# Altium footprint library LimeMicroAltiumLib.PcbLib: 876 footprints (part 2 of 57)
Each footprint in its own frame and in the unit in brackets; x right, y up, seen from the top. Pads: shape width x height; smd on the part's side, far side on the other; paste and mask are expansions set on the pad; w line width, h text height; cw(c..) or ccw(c..) is an arc to the next point about the centre after c.
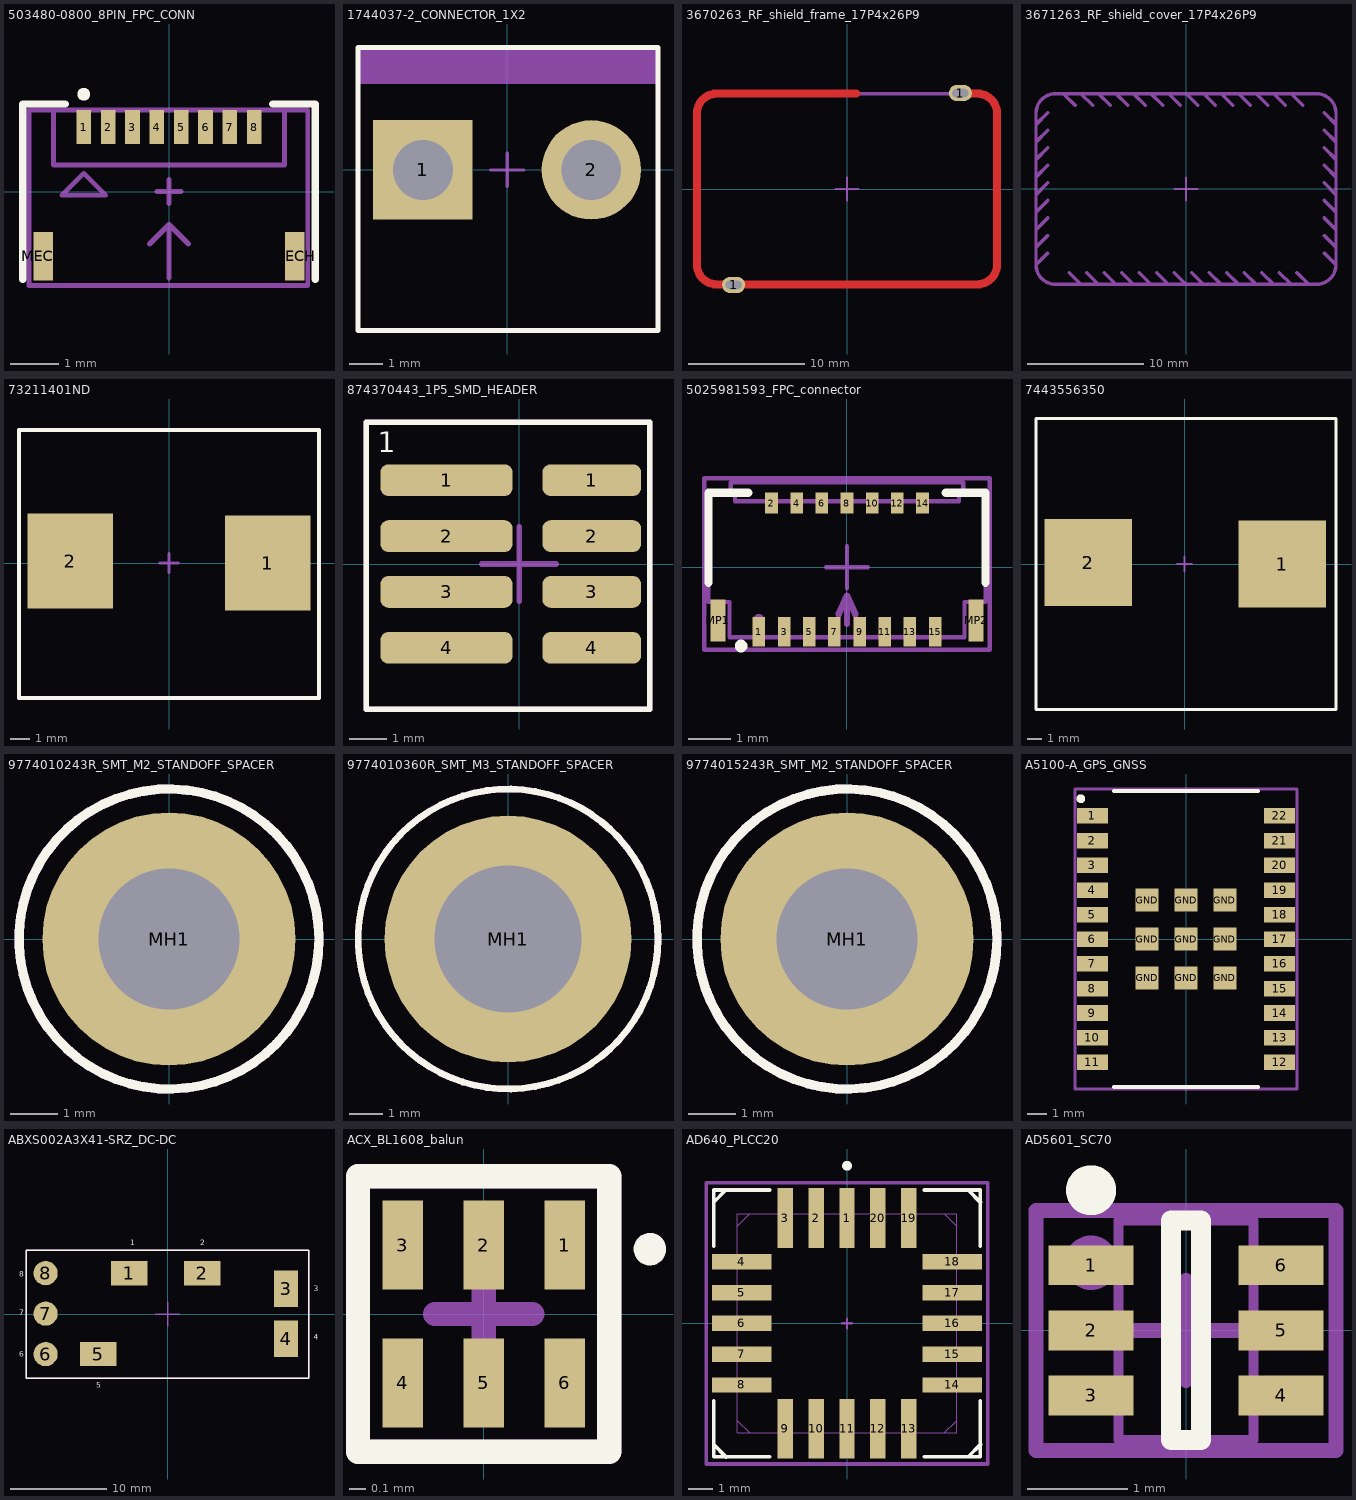
[diagram p1: the footprints below, top view; thin cyan lines are the x and y axes]

## 503480-0800_8PIN_FPC_CONN [mm]
pads (10):
  rect 0.3x0.7 smd mask+0.05: 1(-1.75,1.325) 2(-1.25,1.325) 3(-0.75,1.325) 4(-0.25,1.325) 5(0.25,1.325) 6(0.75,1.325) 7(1.25,1.325) 8(1.75,1.325)
  rect 0.4x1 smd mask+0.05: MECH(-2.58,-1.325) MECH(2.58,-1.325)
Top Overlay:
  circle w0.2: c-1.75,2 r0.033
  lines w0.15: -3,-1.8 -3,1.8 -2.125,1.8 ; 2.125,1.8 3,1.8 3,-1.8
Mechanical 15:
  lines w0.1: -2.375,1.65 -2.375,0.55 2.375,0.55 2.375,1.65 ; -1.3,-0.075 -2.201,-0.075 -1.75,0.376 -1.299,-0.075 ; -0.4,-1.075 0,-0.675 ; -0.25,0 0,0 ; 0,-1.775 0,-0.675 ; 0,-0.25 0,0 ; 0,0.25 0,0 ; 0.25,0 0,0 ; 0.4,-1.075 0,-0.675 ; 0,-0.675 0,-0.675 ; -2.875,-1.925 2.85,-1.925 2.85,1.675 -2.875,1.675 -2.875,-1.925
  text ".Designator" at 0,0 h0.55
3D body "Molex FPC 503480-0800.stp": height 1.88, standoff -0.02, extent -2.85,-1.925 2.85,1.675

## 1744037-2_CONNECTOR_1X2 [mm]
pads (2):
  rect 3x3 hole 1.8 mask+0.05: 1(-2.54,0)
  round 3 hole 1.8 mask+0.05: 2(2.54,0)
Top Overlay:
  lines w0.152: -4.5,-4.85 -4.5,3.7 4.55,3.7 4.55,-4.85 -4.5,-4.85
Mechanical 15:
  region: -4.5,3.7 -4.5,2.6 4.55,2.6 4.55,3.7
  lines w0.1: 0.5,0 -0.5,0 0,0 ; 0,0 0,-0.5 0,0.5 0,0 ; -4.5,-4.85 4.55,-4.85 4.55,3.7 -4.5,3.7 -4.5,-4.85
  text "Locking shroud" at -3.75,1.9 h0.55
  text ".Designator" at 0,0 h0.55
3D body "c-1744037-2-1-3d.stp": height 10.9, standoff -3.7, extent -4.52,-4.82 4.52,3.7

## 3670263_RF_shield_frame_17P4x26P9 [mm]
pads (2):
  oval 2x1.4 hole 0.7 slot 1.4 at 0 deg mask+0.05: 1(-9.75,-8.25) 1(9.75,8.25)
Top Layer:
  lines w0.7: 0.8,8.2 -11.207,8.2 ccw(c-11.207,6.507) -12.9,6.507 -12.9,-6.507 ccw(c-11.207,-6.507) -11.207,-8.2 11.207,-8.2 ccw(c11.207,-6.507) 12.9,-6.507 12.9,6.507 ccw(c11.207,6.507) 11.207,8.2 9.75,8.2
Mechanical 15:
  lines w0.15: -1,0 0,0 ; 0,-1 0,0 ; 0,1 0,0 ; 1,0 0,0
  lines w0.3: -12.9,-6.507 ccw(c-11.207,-6.507) -11.207,-8.2 11.207,-8.2 ccw(c11.207,-6.507) 12.9,-6.507 12.9,6.507 ccw(c11.207,6.507) 11.207,8.2 -11.207,8.2 ccw(c-11.207,6.507) -12.9,6.507 -12.9,-6.507
  text ".Designator" at 0,0 h0.55
  text "RF shield frame" at -3.5,-7.7 h0.55
3D body "STP_3670263 (rev1).stp": height 4.5, standoff -1.2, extent -13.15,-8.4 13.15,8.4

## 3671263_RF_shield_cover_17P4x26P9 [mm]
Mechanical 15:
  lines w0.15: -1,0 0,0 ; 0,-1 0,0 ; 0,1 0,0 ; 1,0 0,0
  lines w0.3: -12.9,-5 -11.9,-4 ; -12.9,-3.493 -11.9,-2.493 ; -12.9,-1.986 -11.9,-0.986 ; -12.9,-0.478 -11.9,0.522 ; -12.9,1.029 -11.9,2.029 ; -12.9,2.536 -11.9,3.536 ; -12.9,4.043 -11.9,5.043 ; -12.9,5.55 -11.9,6.55 ; -11.9,-5.507 -12.9,-6.507 ; -10.543,8.2 -9.543,7.2 ; -10.05,-7.2 -9.05,-8.2 ; -9.036,8.2 -8.036,7.2 ; -8.543,-7.2 -7.543,-8.2 ; -7.529,8.2 -6.529,7.2 ; -7.036,-7.2 -6.036,-8.2 ; -6.022,8.2 -5.022,7.2 ; -5.529,-7.2 -4.529,-8.2 ; -4.514,8.2 -3.514,7.2 ; -4.022,-7.2 -3.022,-8.2 ; -3.007,8.2 -2.007,7.2 ; -2.514,-7.2 -1.514,-8.2 ; -1.5,8.2 -0.5,7.2 ; -1.007,-7.2 -0.007,-8.2 ; 0.007,8.2 1.007,7.2 ; 0.5,-7.2 1.5,-8.2 ; 1.514,8.2 2.514,7.2 ; 2.007,-7.2 3.007,-8.2 ; 3.022,8.2 4.022,7.2 ; 3.514,-7.2 4.514,-8.2 ; 4.529,8.2 5.529,7.2 ; 5.022,-7.2 6.022,-8.2 ; 6.036,8.2 7.036,7.2 ; 6.529,-7.2 7.529,-8.2 ; 7.543,8.2 8.543,7.2 ; 8.036,-7.2 9.036,-8.2 ; 9.05,8.2 10.05,7.2 ; 9.543,-7.2 10.543,-8.2 ; 11.9,-5.507 12.9,-6.507 ; 11.9,-4 12.9,-5 ; 11.9,-2.493 12.9,-3.493 ; 11.9,-0.986 12.9,-1.986 ; 11.9,0.522 12.9,-0.478 ; 11.9,2.029 12.9,1.029 ; 11.9,3.536 12.9,2.536 ; 11.9,5.043 12.9,4.043 ; 11.9,6.55 12.9,5.55 ; -12.9,-6.507 ccw(c-11.207,-6.507) -11.207,-8.2 11.207,-8.2 ccw(c11.207,-6.507) 12.9,-6.507 ; -12.9,-6.507 -12.9,6.507 cw(c-11.207,6.507) -11.207,8.2 11.207,8.2 cw(c11.207,6.507) 12.9,6.507 12.9,-6.507
  text ".Designator" at 0,0 h0.55
  text "RF shield cover" at -3.5,6.4 h0.55
3D body "STP_3671263 (rev1).stp": height 4.9, standoff 0.9, extent -13.45,-8.7 13.45,8.7

## 73211401ND [mm]
pads (2):
  rect 4.5x5 smd: 1(5.2,0) 2(-5.2,0.1)
Top Overlay:
  lines w0.2: -7.9,-7.1 7.9,-7.1 7.9,7 -7.9,7 -7.9,-7.1
Mechanical 15:
  lines w0.15: -0.5,0 0.5,0 ; 0,-0.5 0,0.5 ; -7.9,-7.1 7.9,-7.1 7.9,7 -7.9,7 -7.9,-7.1
  text ".Designator" at 0,0 h0.55
3D body: height 6.5, standoff 0, extent -6.4,-6.4 6.4,6.4

## 874370443_1P5_SMD_HEADER [mm] "Supercapacitor 1.5mm pitch header"
pads (8):
  rrect50% 3.55x0.85 smd mask+0.05: 1(-1.95,2.25) 2(-1.95,0.75) 3(-1.95,-0.75) 4(-1.95,-2.25)
  rrect50% 2.65x0.85 smd mask+0.05: 1(1.95,2.25) 2(1.95,0.75) 3(1.95,-0.75) 4(1.95,-2.25)
Top Overlay:
  lines w0.15: -4.1,-3.9 3.5,-3.9 3.5,3.8 -4.1,3.8 -4.1,-3.9
  text "1" at -3.8,3 h0.55
Mechanical 15:
  lines w0.15: -1,0 0,0 ; 0,-1 0,0 ; 0,1 0,0 ; 1,0 0,0 ; -4.1,-3.9 3.5,-3.9 3.5,3.8 -4.1,3.8 -4.1,-3.9
  text "1" at -3.8,3 h0.55
  text ".Designator" at 0,0 h0.55
3D body "874370443.stp": height 5.77, standoff 0.02, extent -3.25,-3.7 2.75,3.6

## 5025981593_FPC_connector [mm]
pads (17):
  rect 0.3x0.7 smd mask+0.05: 1(-2.1,-1.532) 3(-1.5,-1.532) 5(-0.9,-1.532) 7(-0.3,-1.532) 9(0.3,-1.532) 11(0.9,-1.532) 13(1.5,-1.532) 15(2.1,-1.532)
  rect 0.3x0.5 smd mask+0.05: 2(-1.8,1.533) 4(-1.2,1.533) 6(-0.6,1.533) 8(0,1.533) 10(0.6,1.533) 12(1.2,1.533) 14(1.8,1.533)
  rect 0.35x1 smd mask+0.05: MP1(-3.075,-1.267) MP2(3.075,-1.267)
Top Overlay:
  circle w0.25: c-2.525,-1.875 r0.025
  lines w0.2: -3.3,-0.371 -3.3,1.775 -2.35,1.775 ; 2.35,1.775 3.3,1.775 3.3,-0.371
Mechanical 13:
  lines w0.1: -2.77,1.775 -2.77,2.025 2.77,2.025 2.77,1.775 ; -3.3,-0.825 -3.3,1.775 -2.67,1.775 -2.67,1.575 2.67,1.575 2.67,1.775 3.3,1.775 3.3,-0.825 2.8,-0.825 2.8,-1.667 -2.8,-1.667 -2.8,-0.825 -3.3,-0.825
Mechanical 15:
  circle w0.2: c-2.1,-1.25 r0.035
  lines w0.1: -0.5,0 0.5,0 ; 0,-0.5 0,0.5 ; -3.4,-1.967 3.4,-1.967 3.4,2.125 -3.4,2.125 -3.4,-1.967
  lines w0.15: -0.2,-1.125 0,-0.675 ; 0,-1.35 0,-0.675 ; 0.2,-1.125 0,-0.675
  text "Connector input" at -2.875,-1.8 h0.4
  text ".Designator" at 0,0 h0.55
3D body "5025981593.stp": height 1.16, standoff 0.01, extent -3.3,-1.775 3.3,2.025

## 7443556350 [mm]
pads (2):
  rect 6x6 smd: 1(6.7,0) 2(-6.6,0.1)
Top Overlay:
  lines w0.2: -10.2,-10 -10.2,10 10.4,10 10.4,-10 -10.2,-10
Mechanical 15:
  lines w0.15: -0.5,0 0.5,0 ; 0,-0.5 0,0.5 ; -10.2,-10 -10.2,10 10.4,10 10.4,-10 -10.2,-10
  text ".Designator" at 0,0 h0.55
3D body: height 9, standoff 0, extent -9.1,-9.1 9.1,9.1

## 9774010243R_SMT_M2_STANDOFF_SPACER [mm]
pads (1):
  round 5.4 hole 3 unplated: MH1(0,0)
Top Overlay:
  circle w0.2: c0,0 r3.2
Top Paste:
  region: 0,0
  region: -1.475,0.25 -2.688,0.25 -2.667,0.483 -2.544,0.936 -2.344,1.36 -2.075,1.743 -1.743,2.075 -1.36,2.344 -0.936,2.544 -0.483,2.667 -0.25,2.688 -0.25,1.475 -0.7,1.325 -1.075,1.05 -1.35,0.675
  region: 1.475,0.25 2.688,0.25 2.667,0.483 2.544,0.936 2.344,1.36 2.075,1.743 1.743,2.075 1.36,2.344 0.936,2.544 0.483,2.667 0.25,2.688 0.25,1.475 0.7,1.325 1.075,1.05 1.35,0.675
  region: 1.475,-0.25 2.688,-0.25 2.667,-0.483 2.544,-0.936 2.344,-1.36 2.075,-1.743 1.743,-2.075 1.36,-2.344 0.936,-2.544 0.483,-2.667 0.25,-2.688 0.25,-1.475 0.7,-1.325 1.075,-1.05 1.35,-0.675
  region: -1.475,-0.25 -2.688,-0.25 -2.667,-0.483 -2.544,-0.936 -2.344,-1.36 -2.075,-1.743 -1.743,-2.075 -1.36,-2.344 -0.936,-2.544 -0.483,-2.667 -0.25,-2.688 -0.25,-1.475 -0.7,-1.325 -1.075,-1.05 -1.35,-0.675
Mechanical 15:
  circle w0.2: c0,0 r3.2
  lines w0.15: -0.675,0 0,0 ; 0,-0.675 0,0 ; 0,0.675 0,0 ; 0.675,0 0,0
  text ".Designator" at 0,0 h0.55
  text "SMT M2 screw standoff" at -1.5,0.9 h0.4
3D body "9774010243R+(rev1).stp": height 1, standoff -1.4, extent -2.175,-2.172 2.175,2.172

## 9774010360R_SMT_M3_STANDOFF_SPACER [mm]
pads (1):
  round 7.4 hole 4.4 unplated: MH1(0,0)
Top Overlay:
  circle w0.2: c0,0 r4.5
Top Paste:
  region: -0.4,3.684 -0.609,3.663 -1.02,3.576 -1.417,3.441 -1.797,3.262 -2.154,3.041 -2.483,2.78 -2.78,2.483 -3.041,2.154 -3.262,1.797 -3.441,1.417 -3.576,1.02 -3.663,0.609 -3.684,0.4 -2.163,0.4 -2.127,0.562 -2.019,0.875 -1.865,1.168 -1.668,1.434 -1.434,1.668 -1.168,1.865 -0.875,2.019 -0.562,2.127 -0.4,2.163
  region: 0.4,3.684 0.609,3.663 1.02,3.576 1.417,3.441 1.797,3.262 2.154,3.041 2.483,2.78 2.78,2.483 3.041,2.154 3.262,1.797 3.441,1.417 3.576,1.02 3.663,0.609 3.684,0.4 2.163,0.4 2.127,0.562 2.019,0.875 1.865,1.168 1.668,1.434 1.434,1.668 1.168,1.865 0.875,2.019 0.562,2.127 0.4,2.163
  region: 0.4,-3.684 0.609,-3.663 1.02,-3.576 1.417,-3.441 1.797,-3.262 2.154,-3.041 2.483,-2.78 2.78,-2.483 3.041,-2.154 3.262,-1.797 3.441,-1.417 3.576,-1.02 3.663,-0.609 3.684,-0.4 2.163,-0.4 2.127,-0.562 2.019,-0.875 1.865,-1.168 1.668,-1.434 1.434,-1.668 1.168,-1.865 0.875,-2.019 0.562,-2.127 0.4,-2.163
  region: -0.4,-3.684 -0.609,-3.663 -1.02,-3.576 -1.417,-3.441 -1.797,-3.262 -2.154,-3.041 -2.483,-2.78 -2.78,-2.483 -3.041,-2.154 -3.262,-1.797 -3.441,-1.417 -3.576,-1.02 -3.663,-0.609 -3.684,-0.4 -2.163,-0.4 -2.127,-0.562 -2.019,-0.875 -1.865,-1.168 -1.668,-1.434 -1.434,-1.668 -1.168,-1.865 -0.875,-2.019 -0.562,-2.127 -0.4,-2.163
Mechanical 15:
  circle w0.2: c0,0 r4.501
  lines w0.15: -0.675,0 0,0 ; 0,-0.675 0,0 ; 0,0.675 0,0 ; 0.675,0 0,0
  text "SMT M3 screw standoff" at -2.4,1.2 h0.4
  text ".Designator" at 0,0 h0.55
3D body "9774010360R.stp": height 1, standoff -1.4, extent -3,-3 3,3

## 9774015243R_SMT_M2_STANDOFF_SPACER [mm]
pads (1):
  round 5.4 hole 3 unplated: MH1(0,0)
Top Overlay:
  circle w0.2: c0,0 r3.2
Top Paste:
  region: 0,0
  region: -1.475,0.25 -2.688,0.25 -2.667,0.483 -2.544,0.936 -2.344,1.36 -2.075,1.743 -1.743,2.075 -1.36,2.344 -0.936,2.544 -0.483,2.667 -0.25,2.688 -0.25,1.475 -0.7,1.325 -1.075,1.05 -1.35,0.675
  region: 1.475,0.25 2.688,0.25 2.667,0.483 2.544,0.936 2.344,1.36 2.075,1.743 1.743,2.075 1.36,2.344 0.936,2.544 0.483,2.667 0.25,2.688 0.25,1.475 0.7,1.325 1.075,1.05 1.35,0.675
  region: 1.475,-0.25 2.688,-0.25 2.667,-0.483 2.544,-0.936 2.344,-1.36 2.075,-1.743 1.743,-2.075 1.36,-2.344 0.936,-2.544 0.483,-2.667 0.25,-2.688 0.25,-1.475 0.7,-1.325 1.075,-1.05 1.35,-0.675
  region: -1.475,-0.25 -2.688,-0.25 -2.667,-0.483 -2.544,-0.936 -2.344,-1.36 -2.075,-1.743 -1.743,-2.075 -1.36,-2.344 -0.936,-2.544 -0.483,-2.667 -0.25,-2.688 -0.25,-1.475 -0.7,-1.325 -1.075,-1.05 -1.35,-0.675
Mechanical 15:
  circle w0.2: c0,0 r3.2
  lines w0.15: -0.675,0 0,0 ; 0,-0.675 0,0 ; 0,0.675 0,0 ; 0.675,0 0,0
  text ".Designator" at 0,0 h0.55
  text "SMT M2 screw standoff" at -1.5,0.9 h0.4
3D body "9774015243R+(rev1).stp": height 1.5, standoff -1.4, extent -2.175,-2.172 2.175,2.172

## A5100-A_GPS_GNSS [mm] "RF Receiver 1.575GHz -165dBm 115.2kBaud Module"
pads (31):
  rect 1.6x0.8 smd mask+0.05: 1(-4.8,6.32) 2(-4.8,5.05) 3(-4.8,3.78) 4(-4.8,2.51) 5(-4.8,1.24) 6(-4.8,-0.01) 7(-4.8,-1.28) 8(-4.8,-2.55) 9(-4.8,-3.8) 10(-4.8,-5.07) 11(-4.8,-6.32) 12(4.8,-6.32) 13(4.8,-5.07) 14(4.8,-3.8) 15(4.8,-2.55) 16(4.8,-1.28) 17(4.8,-0.01) 18(4.8,1.24) 19(4.8,2.51) 20(4.8,3.78) 21(4.8,5.05) 22(4.8,6.32)
  rect 1.2x1.2 smd mask+0.05: GND(-2,-2) GND(-2,0) GND(-2,2) GND(0,-2) GND(0,0) GND(0,2) GND(2,-2) GND(2,0) GND(2,2)
Top Overlay:
  circle w0.25: c-5.4,7.2 r0.1
  lines w0.2: -3.7,-7.6 3.7,-7.6 ; -3.7,7.6 3.7,7.6
Mechanical 15:
  circle w0.25: c-4.8,6.2 r0.1
  lines w0.15: -0.5,0 0.5,0 ; 0,-0.5 0,0.5 ; -5.7,-7.7 -5.7,7.7 5.7,7.7 5.7,-7.7 -5.7,-7.7
  text ".Designator" at 0.025,0 h0.55
  text "Stencil thickness:  / 120um-150um" at -1,-5.1 h0.55
3D body: height 2.51, standoff 0, extent -3.488,5.003 -2.094,6.4
3D body: height 2.5, standoff 1.6, extent -4,-7 4,7
3D body: height 1.6, standoff 0, extent -5.1,-7.5 5.1,7.5

## ABXS002A3X41-SRZ_DC-DC [mm]
pads (8):
  rect 3.78x2.51 smd mask+0.05: 1(-3.975,4.255) 2(3.615,4.255) 5(-7.155,-4.125)
  rect 2.51x3.78 smd mask+0.05: 3(12.265,2.645) 4(12.265,-2.535)
  round 2.51 smd mask+0.05: 6(-12.625,-4.125) 7(-12.625,0.065) 8(-12.625,4.255)
Top Overlay:
  lines w0.15: -14.625,-6.625 -14.625,6.625 14.625,6.625 14.625,-6.625 -14.625,-6.625
  text "1" at -3.875,7.125 h0.55
  text "2" at 3.375,7.125 h0.55
  text "3" at 15.125,2.375 h0.55
  text "4" at 15.125,-2.625 h0.55
  text "5" at -7.375,-7.625 h0.55
  text "6" at -15.375,-4.375 h0.55
  text "7" at -15.375,-0.125 h0.55
  text "8" at -15.375,3.875 h0.55
Mechanical 15:
  lines w0.15: -1.25,0 0,0 ; 0,-1.25 0,0 ; 0,1.25 0,0 ; 1.25,0 0,0 ; -14.625,-6.625 -14.625,6.625 14.625,6.625 14.625,-6.625 -14.625,-6.625
  text "8" at -12.875,3.875 h0.55
  text "7" at -12.875,-0.125 h0.55
  text "6" at -12.875,-4.375 h0.55
  text "5" at -7.25,-4.25 h0.55
  text "4" at 12.125,-2.625 h0.55
  text "3" at 12.125,2.375 h0.55
  text "2" at 3.125,4.125 h0.55
  text "1" at -4.125,4.125 h0.55
  text ".Designator" at 0,0 h0.55
3D body "ABXS002A3X41-SRZ--3DModel-STEP-56544.STEP": height 7.52, standoff 0.03, extent -14.095,-5.65 13.845,5.78

## ACX_BL1608_balun [mm]
pads (6):
  rect 0.25x0.55 smd mask+0.05: 1(0.5,0.425) 2(0,0.425) 3(-0.5,0.425) 4(-0.5,-0.425) 5(0,-0.425) 6(0.5,-0.425)
Top Overlay:
  circle w0.1: c1.025,0.4 r0.05
  lines w0.15: -0.775,-0.85 -0.775,0.85 0.775,0.85 0.775,-0.85 -0.775,-0.85
Mechanical 15:
  circle w0.1: c0.5,0.475 r0.05
  lines w0.15: -0.3,0 0,0 ; 0,-0.3 0,0 ; 0,0.3 0,0 ; 0.3,0 0,0 ; -0.775,-0.85 0.775,-0.85 0.775,0.85 -0.775,0.85 -0.775,-0.85
  text ".Designator" at 0,0 h0.55
3D body: height 0.6, standoff 0, extent -0.8,-0.4 0.8,0.4
3D body: height 0.6, standoff 0, extent -0.6,-0.425 -0.4,-0.275
3D body: height 0.6, standoff 0, extent -0.1,-0.425 0.1,-0.275
3D body: height 0.6, standoff 0, extent 0.4,-0.425 0.6,-0.275
3D body: height 0.6, standoff 0, extent 0.4,0.275 0.6,0.425
3D body: height 0.6, standoff 0, extent -0.1,0.275 0.1,0.425
3D body: height 0.6, standoff 0, extent -0.6,0.275 -0.4,0.425
3D body: height 0.6, standoff 0, extent 0.4,-0.075 0.6,0.15

## AD640_PLCC20 [mil]
pads (20):
  rect 25x97 smd mask+1.97: 1(0,171) 2(-50,171) 3(-100,171) 9(-100,-171) 10(-50,-171) 11(0,-171) 12(50,-171) 13(100,-171) 19(100,171) 20(50,171)
  rect 97x25 smd mask+1.97: 4(-171,100) 5(-171,50) 6(-171,0) 7(-171,-50) 8(-171,-100) 14(171,-100) 15(171,-50) 16(171,0) 17(171,50) 18(171,100)
Top Overlay:
  circle w10: c0,255.91 r2.95
  lines w6: -216.54,-196.85 -196.54,-216.85 ; -216.54,-125.5 -216.54,-216.54 -125.5,-216.54 ; -216.54,125.5 -216.54,216.54 -125.5,216.54 ; -216.54,196.85 -196.54,216.85 ; 125.5,-216.54 216.54,-216.54 216.54,-125.5 ; 125.5,216.54 216.54,216.54 216.54,125.5 ; 196.85,-216.54 216.85,-196.54 ; 196.85,216.54 216.85,196.54
Mechanical 13:
  lines w2: -178,-158 -158,-178 ; -178,158 -158,178 ; 158,-178 178,-158 ; 158,178 178,158 ; -197.5,-110.5 -197.5,-89.5 -178,-89.5 -178,-110.5 -197.5,-110.5 ; -197.5,-60.5 -197.5,-39.5 -178,-39.5 -178,-60.5 -197.5,-60.5 ; -197.5,-10.5 -197.5,10.5 -178,10.5 -178,-10.5 -197.5,-10.5 ; -197.5,39.5 -197.5,60.5 -178,60.5 -178,39.5 -197.5,39.5 ; -197.5,89.5 -197.5,110.5 -178,110.5 -178,89.5 -197.5,89.5 ; -178,-178 178,-178 178,178 -178,178 -178,-178 ; -110.5,-197.5 -110.5,-178 -89.5,-178 -89.5,-197.5 -110.5,-197.5 ; -110.5,178 -89.5,178 -89.5,197.5 -110.5,197.5 -110.5,178 ; -60.5,-197.5 -60.5,-178 -39.5,-178 -39.5,-197.5 -60.5,-197.5 ; -60.5,178 -39.5,178 -39.5,197.5 -60.5,197.5 -60.5,178 ; -10.5,-197.5 -10.5,-178 10.5,-178 10.5,-197.5 -10.5,-197.5 ; -10.5,178 10.5,178 10.5,197.5 -10.5,197.5 -10.5,178 ; 39.5,-197.5 39.5,-178 60.5,-178 60.5,-197.5 39.5,-197.5 ; 39.5,178 60.5,178 60.5,197.5 39.5,197.5 39.5,178 ; 89.5,-197.5 89.5,-178 110.5,-178 110.5,-197.5 89.5,-197.5 ; 89.5,178 110.5,178 110.5,197.5 89.5,197.5 89.5,178 ; 178,-110.5 178,-89.5 197.5,-89.5 197.5,-110.5 178,-110.5 ; 178,-60.5 178,-39.5 197.5,-39.5 197.5,-60.5 178,-60.5 ; 178,-10.5 178,10.5 197.5,10.5 197.5,-10.5 178,-10.5 ; 178,39.5 178,60.5 197.5,60.5 197.5,39.5 178,39.5 ; 178,89.5 178,110.5 197.5,110.5 197.5,89.5 178,89.5
Mechanical 15:
  circle w10: c0,171.26 r2.95
  lines w3.94: -7.87,0 0,0 ; 0,-7.87 0,0 ; 0,7.87 0,0 ; 7.87,0 0,0
  lines w6: -228.35,-228.35 -228.35,228.35 228.35,228.35 228.35,-228.35 -228.35,-228.35
  text ".Designator" at 0,0 h21.65
3D body: height 10, standoff 0, extent 0,0 10,10
3D body "P_20A-M.step": height 199.8, standoff 0.18, extent -197.48,-197.48 197.48,197.48

## AD5601_SC70 [mm] "SOT23, 6-Leads, Body 2x1.3mm, Pitch 0.65mm, Lead Span 2.1mm, IPC Medium Density"
height 1.1
pads (6):
  rect 0.85x0.4 smd mask+0.05: 1(-0.95,0.65) 2(-0.95,0) 3(-0.95,-0.65) 4(0.95,-0.65) 5(0.95,0) 6(0.95,0.65)
Top Overlay:
  circle w0.25: c-0.95,1.4 r0.125
  lines w0.2: -0.15,-1.1 0.15,-1.1 0.15,1.1 -0.15,1.1 -0.15,-1.1
Mechanical 13:
  lines w0.1: -0.675,-1.1 -0.675,1.1 0.675,1.1 0.675,-1.1 -0.675,-1.1
Mechanical 15:
  circle w0.4: c-0.95,0.675 r0.071
  lines w0.15: -0.5,0 0.5,0 ; 0,-0.5 0,0.5 ; -1.5,-1.2 -1.5,1.2 1.5,1.2 1.5,-1.2 -1.5,-1.2
  text ".Designator" at 0,0 h0.55
3D body "User Library-SC70-6.step": height 0.43, standoff -0.53, extent -1.05,-1 1.05,1